# Altium schematic symbol library EEU-EE2W330.SchLib: 1 symbol
Pins are listed as number, name and electrical type; pins without a type are passive.

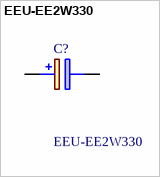
[diagram p0: symbol EEU-EE2W330]

## EEU-EE2W330
designator C?
Aluminium Electrolytic Capacitor, Radial Lead,33uF,450V; Manufacturer_Name: Panasonic; Geometry.Height: 27mm; Manufacturer_Part_Number: EEU-EE2W330; Mouser Part Number: 667-EEU-EE2W330; Mouser Price/Stock: https://www.mouser.co.uk/ProductDetail/Panasonic/EEU-EE2W330?qs=bZLtalHQkT009s%2Fa1sZ%2FZA%3D%3D; Arrow Part Number: EEU-EE2W330; Arrow Price/Stock: https://www.arrow.com/en/products/eeu-ee2w330/panasonic?region=europe; Datasheet Link: http://industrial.panasonic.com/cdbs/www-data/pdf/RDF0000/ABA0000C1026.pdf
footprint CAPPRD750W85D1600H2700
pins: 1 +, 2 -